# Altium footprint library Driver.PcbLib: 2 footprints
Each footprint in its own frame and in the unit in brackets; x right, y up, seen from the top. Pads: shape width x height; smd on the part's side, far side on the other; paste and mask are expansions set on the pad; w line width, h text height; cw(c..) or ccw(c..) is an arc to the next point about the centre after c.
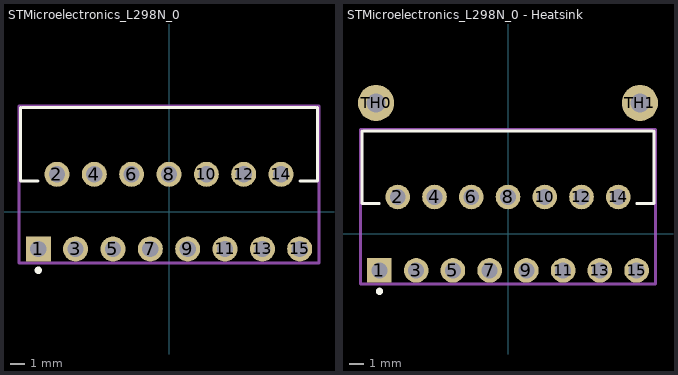
[diagram p0: the footprints below, top view; thin cyan lines are the x and y axes]

## STMicroelectronics_L298N_0 [mm]
pads (15):
  rect 1.7x1.7 hole 1.1 paste-2539.97 mask+0: 1(-8.89,-2.54)
  round 1.7 hole 1.1 paste-2539.97 mask+0: 2(-7.62,2.54) 3(-6.35,-2.54) 4(-5.08,2.54) 5(-3.81,-2.54) 6(-2.54,2.54) 7(-1.27,-2.54) 8(0,2.54) 9(1.27,-2.54) 10(2.54,2.54) 11(3.81,-2.54) 12(5.08,2.54) 13(6.35,-2.54) 14(7.62,2.54) 15(8.89,-2.54)
Top Overlay:
  circle w0.25: c-8.89,-3.985 r0.125
  lines w0.2: -10.1,7.09 -10.1,2.09 -8.9,2.09 ; -10,7.09 10,7.09 ; 8.9,2.09 10.1,2.09 10.1,7.09
Top Designator (Mech4):
  text ".Designator" at -3.71,1.184 h1.52
Mechanical 10:
  lines w0.2: -10.2,-3.49 10.2,-3.49 10.2,7.19 -10.2,7.19 -10.2,-3.49
3D body "L298.SLDPRT": height 21.8, standoff -3.6, extent -10.1,-2.849 10.1,7.056

## STMicroelectronics_L298N_0 - Heatsink [mm]
pads (17):
  rect 1.7x1.7 hole 1.1 paste-2539.97 mask+0: 1(-8.89,-2.54)
  round 1.7 hole 1.1 paste-2539.97 mask+0: 2(-7.62,2.54) 3(-6.35,-2.54) 4(-5.08,2.54) 5(-3.81,-2.54) 6(-2.54,2.54) 7(-1.27,-2.54) 8(0,2.54) 9(1.27,-2.54) 10(2.54,2.54) 11(3.81,-2.54) 12(5.08,2.54) 13(6.35,-2.54) 14(7.62,2.54) 15(8.89,-2.54)
  round 2.5 hole 1.3 paste-2539.97 mask+0: TH0(-9.12,9.04) TH1(9.12,9.04)
Top Overlay:
  circle w0.25: c-8.89,-3.985 r0.125
  lines w0.2: -10.1,7.09 -10.1,2.09 -8.9,2.09 ; -10,7.09 10,7.09 ; 8.9,2.09 10.1,2.09 10.1,7.09
Top Designator (Mech4):
  text ".Designator" at -3.71,1.184 h1.52
Mechanical 10:
  lines w0.2: -10.2,-3.49 10.2,-3.49 10.2,7.19 -10.2,7.19 -10.2,-3.49
3D body "User Library-YA25.STEP": height 25, standoff -4, extent -11.75,0.057 11.75,17.057
3D body "L298.SLDPRT": height 21.8, standoff -3.6, extent -10.1,-2.849 10.1,7.056